# Altium footprint library Ib_.PcbLib: 55 footprints (part 4 of 4)
Each footprint in its own frame and in the unit in brackets; x right, y up, seen from the top. Pads: shape width x height; smd on the part's side, far side on the other; paste and mask are expansions set on the pad; w line width, h text height; cw(c..) or ccw(c..) is an arc to the next point about the centre after c.
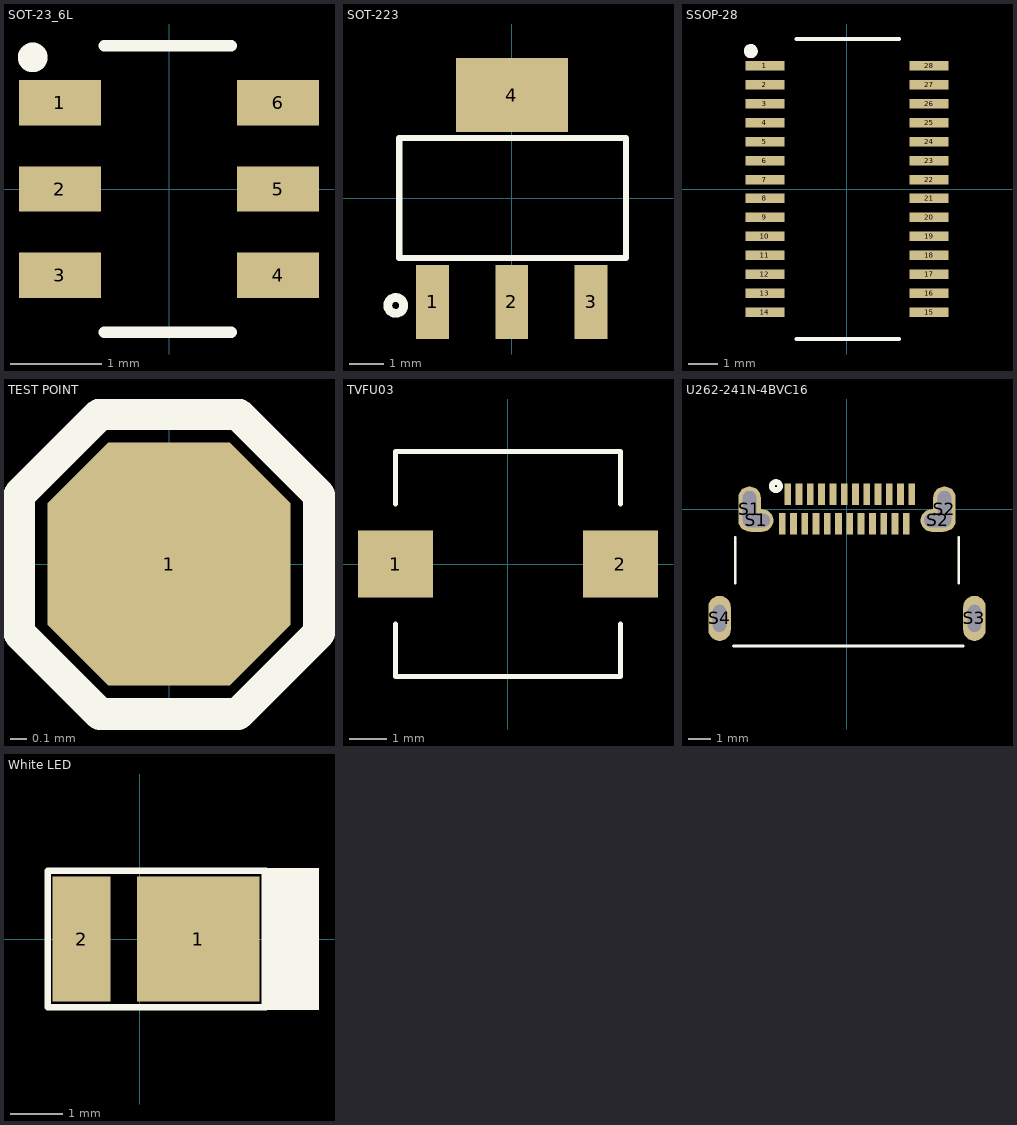
[diagram p3: the footprints below, top view; thin cyan lines are the x and y axes]

## SOT-23_6L [mm]
pads (6):
  rect 0.9x0.5 smd: 1(-1.2,0.95) 2(-1.2,0) 3(-1.2,-0.95) 4(1.2,-0.95) 5(1.2,0) 6(1.2,0.95)
Top Overlay:
  circle w0.254: c-1.499,1.448 r0.036
  lines w0.127: -0.711,-1.575 0.686,-1.575 ; -0.711,1.575 0.686,1.575
3D body "User Library-SOT-23-6L.step": height 1.37, standoff -0.03, extent -1.5,-1.524 1.5,1.524

## SOT-223 [mm] "Adjustable 18V 1.25V ~ 16.6V 1.4V @ 1A SOT-223 Linear Voltage Regulators (LDO) RoHS"
pads (4):
  rect 0.95x2.15 smd: 1(-2.3,-3.002) 2(0,-3.002) 3(2.3,-3.002)
  rect 3.25x2.15 smd: 4(0,3.002)
Top Overlay:
  circle w0.254: c-3.367,-3.103 r0.23
  lines w0.178: -3.265,-1.727 -3.265,1.753 3.313,1.753 3.313,-1.727 -3.265,-1.727
3D body "SW3dPS-SOT-223-1.STEP": height 1.54, standoff -0.11, extent -3.237,-3.454 3.263,3.546

## SSOP-28 [mm]
pads (28):
  rect 1.3x0.32 smd: 1(-2.75,4.127) 2(-2.75,3.492) 3(-2.75,2.857) 4(-2.75,2.222) 5(-2.75,1.587) 6(-2.75,0.953) 7(-2.75,0.318) 8(-2.75,-0.318) 9(-2.75,-0.953) 10(-2.75,-1.587) 11(-2.75,-2.222) 12(-2.75,-2.857) 13(-2.75,-3.492) 14(-2.75,-4.127) 15(2.75,-4.127) 16(2.75,-3.492) 17(2.75,-2.857) 18(2.75,-2.222) 19(2.75,-1.587) 20(2.75,-0.953) 21(2.75,-0.318) 22(2.75,0.318) 23(2.75,0.953) 24(2.75,1.587) 25(2.75,2.222) 26(2.75,2.857) 27(2.75,3.492) 28(2.75,4.127)
Top Overlay:
  circle w0.254: c-3.226,4.623 r0.108
  lines w0.12: -1.702,-5.029 1.753,-5.029 ; -1.702,5.029 1.753,5.029
3D body "User Library-SSOP28_LTC1923.STEP": height 1.75, standoff 0, extent -3.094,-4.991 3.094,4.991

## TEST POINT [mil]
pads (1):
  oct 60x60 smd: 1(0,0)
Top Overlay:
  lines w7.87: -17,-37 17,-37 ; -17,-37 -37,-17 -37,17 -17,37 ; -17,-37 17,-37 ; -17,37 17,37 ; -17,37 17,37 ; 17,-37 37,-17 37,17 17,37

## TVFU03 [mm]
pads (2):
  rect 2x1.8 smd: 1(-3,0) 2(3,0)
Top Overlay:
  lines w0.127: -3,-1.597 -3,-3 0,-3 3,-3 3,-1.597 ; -3,1.597 -3,3 0,3 3,3 3,1.597

## U262-241N-4BVC16 [mm]
pads (30):
  rect 0.3x0.95 smd: A1(-2.625,0.65) A2(-2.125,0.65) A3(-1.625,0.65) A4(-1.125,0.65) A5(-0.625,0.65) A6(-0.125,0.65) A7(0.375,0.65) A8(0.875,0.65) A9(1.375,0.65) A10(1.875,0.65) A11(2.375,0.65) A12(2.875,0.65) B1(2.625,-0.65) B2(2.125,-0.65) B3(1.625,-0.65) B4(1.125,-0.65) B5(0.625,-0.65) B6(0.125,-0.65) B7(-0.375,-0.65) B8(-0.875,-0.65) B9(-1.375,-0.65) B10(-1.875,-0.65) B11(-2.375,-0.65) B12(-2.875,-0.65)
  oval 1x2 hole 0.6 slot 1.6 at 90 deg: S1(-4.32,0) S2(4.32,0)
  oval 1.5x1 hole 0.6 slot 1.2 at 0 deg: S1(-4.013,-0.508) S2(4.013,-0.508)
  oval 1x2 hole 0.6 slot 1.2 at 90 deg: S3(5.65,-4.85) S4(-5.65,-4.85)
Top Overlay:
  circle w0.254: c-3.15,1.016 r0.18
  lines w0.127: -5.029,-6.071 5.156,-6.071 ; -4.953,-3.277 -4.953,-1.27 ; 4.953,-3.277 4.953,-1.27
3D body "u262-24xn-4bvc16.stp": height 2.13, standoff -1.03, extent -5.8,-7.391 5.8,0.909

## White LED [mm]
pads (2):
  rect 2.33x2.38 smd: 1(1.108,0)
  rect 1.1x2.38 smd: 2(-1.107,0)
Top Overlay:
  region: 3.404,1.346 2.311,1.346 2.311,-1.346 3.404,-1.346
  lines w0.127: 2.388,-1.295 -1.753,-1.295 -1.753,1.295 2.388,1.295